# Altium schematic symbol library Vibration_Datalogger.SchLib: 75 symbols (part 4 of 7)
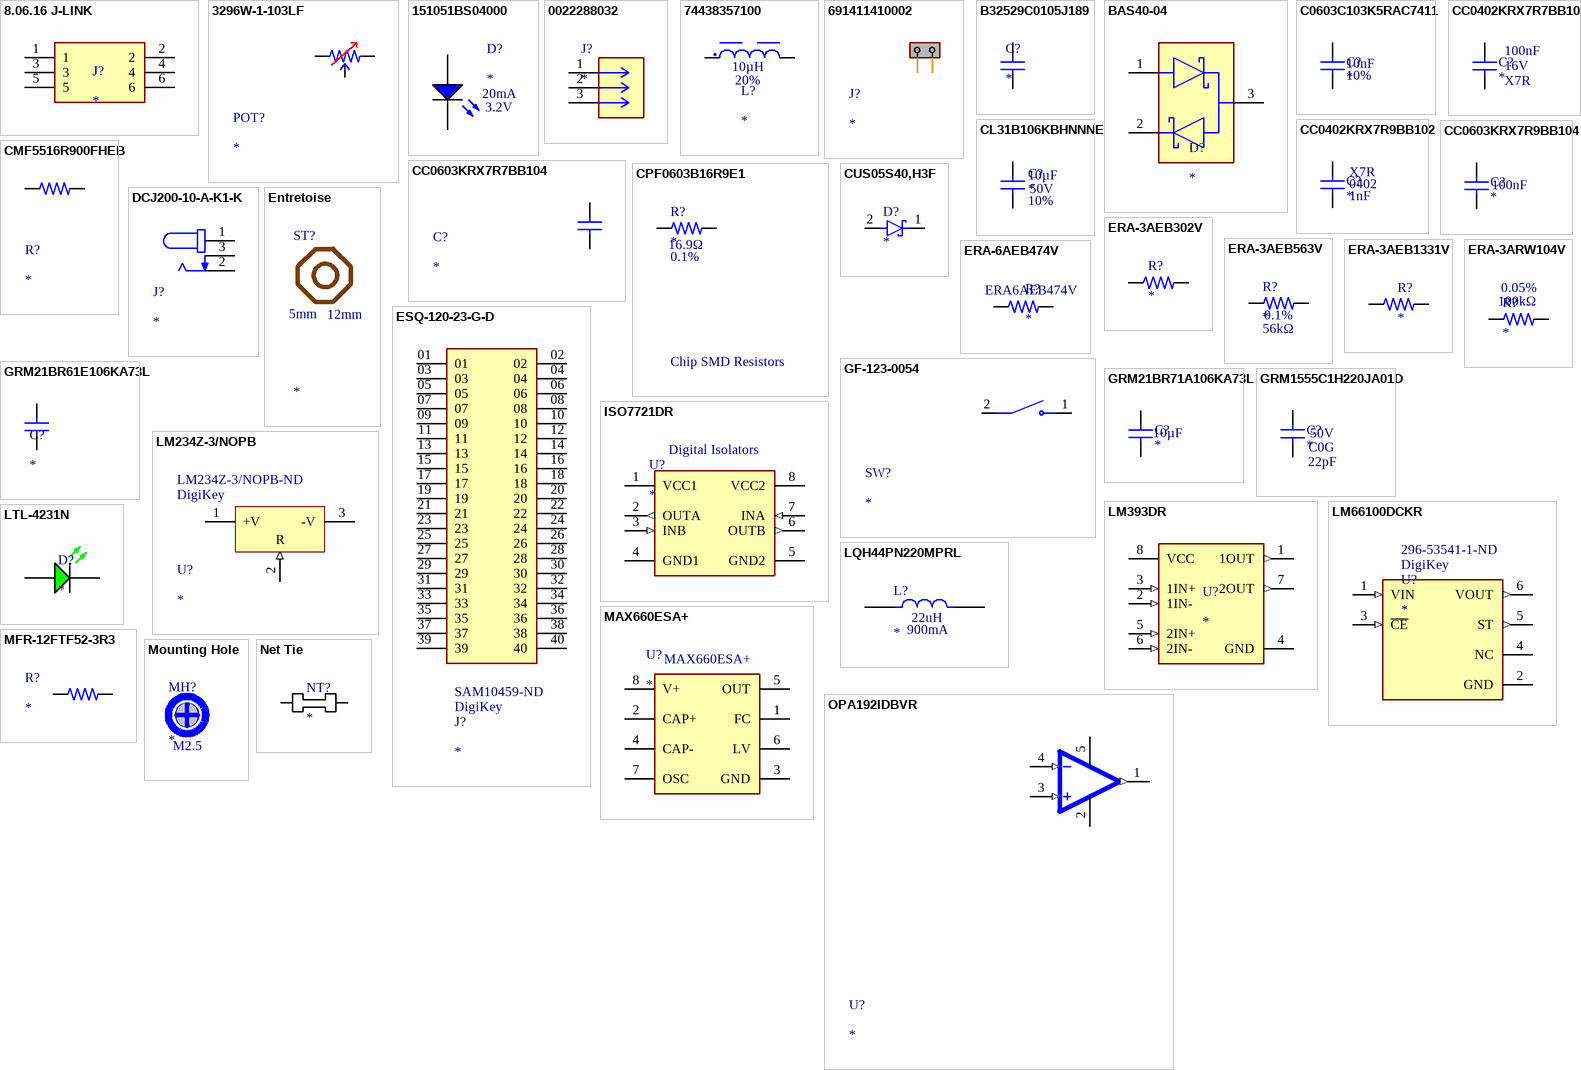
[diagram p4: symbols 8.06.16 J-LINK to OPA192IDBVR]

## LM66100DCKR
designator U?  Supplier 2: DigiKey  Supplier Part Number 2: 296-53541-1-ND
IC OR CTRLR IDEAL DIODE SC70-6; Manufacturer Lifecycle Status: PRODUCTION; Manufacturer: Analog Devices; Manufacturer Part Number: MAX40200EVKIT#; Lifecycle Status: Production; Number of Pins: 0; ComponentLink1URL: https://octopart.com:443/opatz8j6/c1?t=tFvwJybQxdRSwHGuV29_04fkZjjNF1MJo4kinNSI_C2zYoGudT1WcQQrGEb18paZwrfXNr0GAhVW6zbilzcBUB01kDOundBfp3nAPKdGzhNRfNcr8Kd-o-IKbnLChbPI5acuj80HihnZ3YpglhuC93YoD2liOY8pIrKlWfxI2ksNeIXQmkzMRd3OxJBCHjiq5JwTIkqXKKJBcnIlnmQq-BxXXM0xZlJtTE9yy0iN-9Jw-BxLeaepZGVZeQukyGP-V4ddPgPOIL7y7GG0xbs0JlcCHvXn2V6R1aO10raT6v7tAmg4PF3dHGB7KA&src-supplier=Analog+Devices; ComponentLink1Description: https://octopart.com:443/opatz8j6/c1?t=tFvwJybQxdRSwHGuV29_04fkZjjNF1MJo4kinNSI_C2zYoGudT1WcQQrGEb18paZwrfXNr0GAhVW6zbilzcBUB01kDOundBfp3nAPKdGzhNRfNcr8Kd-o-IKbnLChbPI5acuj80HihnZ3YpglhuC93YoD2liOY8pIrKlWfxI2ksNeIXQmkzMRd3OxJBCHjiq5JwTIkqXKKJBcnIlnmQq-BxXXM0xZlJtTE9yy0iN-9Jw-BxLeaepZGVZeQukyGP-V4ddPgPOIL7y7GG0xbs0JlcCHvXn2V6R1aO10raT6v7tAmg4PF3dHGB7KA&src-supplier=Analog+Devices; ComponentLink2URL: https://datasheet.octopart.com:443/MAX40200EVKIT%23-Analog-Devices-datasheet-68620197.pdf?src-supplier=Newark; ComponentLink2Description: https://datasheet.octopart.com:443/MAX40200EVKIT%23-Analog-Devices-datasheet-68620197.pdf?src-supplier=Newark; ComponentLink3URL: https://datasheet.octopart.com:443/MAX40200EVKIT%23-Maxim-Integrated-datasheet-97040573.pdf?src-supplier=Ciiva; ComponentLink3Description: https://datasheet.octopart.com:443/MAX40200EVKIT%23-Maxim-Integrated-datasheet-97040573.pdf?src-supplier=Ciiva; ComponentLink4URL: http://sigma.octopart.com:80/conflict_mineral_statement/Analog-Devices-company-33.pdf?src-supplier=Compliance+Statements; ComponentLink4Description: http://sigma.octopart.com:80/conflict_mineral_statement/Analog-Devices-company-33.pdf?src-supplier=Compliance+Statements; ComponentLink5URL: http://sigma.octopart.com:80/reach_statement/Maxim-Integrated-company-67.pdf?src-supplier=Compliance+Statements; ComponentLink5Description: http://sigma.octopart.com:80/reach_statement/Maxim-Integrated-company-67.pdf?src-supplier=Compliance+Statements; ComponentLink6URL: http://sigma.octopart.com:80/rohs_statement/Maxim-Integrated-company-66.pdf?src-supplier=Compliance+Statements; ComponentLink6Description: http://sigma.octopart.com:80/rohs_statement/Maxim-Integrated-company-66.pdf?src-supplier=Compliance+Statements; ComponentLink7URL: http://sigma.octopart.com:80/conflict_mineral_statement/Maxim-Integrated-company-65.pdf?src-supplier=Compliance+Statements; ComponentLink7Description: http://sigma.octopart.com:80/conflict_mineral_statement/Maxim-Integrated-company-65.pdf?src-supplier=Compliance+Statements; ComponentLink8URL: https://octopart.com:443/opatz8j6/c1?t=lhYu1Dpa7LTUDRbSap38YS8RgdPNFucjyNBj1iBkH97VRV8Rz1sSJR_WbuGUEwASAToy64Q0WSWPLIrJ0T-nAuuegVbGWQDHKGX6zqZYr7BGDpqmoHu2Bx2I_9gTjHXC6Q3FVvsiWqfKxC4DKphXuDHYAktRAVkNYmR-AyWh8y_m0Ao45k5rUSJWIEdRU4kKjG7oew-8Zey8BXwpe1A7gxB-7jWBlaKfgfRJWbIXmBBGq6MNPZxkt7axoHwTDuLmHCNj-BNWr3LFNcmmigWLHCOy2qpNNTU7f_1GGqCMT2krBxkwy2j1AE6zAA&src-supplier=Compliance+Statements; ComponentLink8Description: https://octopart.com:443/opatz8j6/c1?t=lhYu1Dpa7LTUDRbSap38YS8RgdPNFucjyNBj1iBkH97VRV8Rz1sSJR_WbuGUEwASAToy64Q0WSWPLIrJ0T-nAuuegVbGWQDHKGX6zqZYr7BGDpqmoHu2Bx2I_9gTjHXC6Q3FVvsiWqfKxC4DKphXuDHYAktRAVkNYmR-AyWh8y_m0Ao45k5rUSJWIEdRU4kKjG7oew-8Zey8BXwpe1A7gxB-7jWBlaKfgfRJWbIXmBBGq6MNPZxkt7axoHwTDuLmHCNj-BNWr3LFNcmmigWLHCOy2qpNNTU7f_1GGqCMT2krBxkwy2j1AE6zAA&src-supplier=Compliance+Statements; Supplier 1: DigiKey; Supplier Part Number 1: MAX40200EVKIT#-ND; Category: Amplifiers - Op Amps, Buffer, Instrumentation; Height: 1.1mm; Length: 2mm; Schedule B: 8542390000, 8542390000|8542390000|8542390000|8542390000|8542390000; Thickness: 900µm; Width: 1.25mm; ComponentLink9URL: https://sigma.octopart.com:443/182282881/technical_drawing/Texas-Instruments-LM66100DCKR.pdf?src-supplier=Texas+Instruments; ComponentLink9Description: https://sigma.octopart.com:443/182282881/technical_drawing/Texas-Instruments-LM66100DCKR.pdf?src-supplier=Texas+Instruments; ComponentLink10URL: https://octopart.com:443/opatz8j6/c1?t=gPN0KfNaSyl1Jmpah-FtwEVBma6UUM1rl0h9fkGMVmOMkDkGAR5eANZSmXeULewPONOsdPcJF3l7HmsVxdSPKkJhfxN-W-y3_Dz8nEmVy4_KCMSg8IKJ1aK1b6dd_-lBB8AspW_E3SjYcpWMYk21piWnDxo2wj_olAEqlfdPT3wM4A0W15MhlRfy1F4koMZBOZ1iTSy3Fn5Q08Ie82jiMGpjle9KvlKTYKALn1cbScAkVWpjv40trNU2vz6I3zWF1hu3m4xMYxVIRa3xiN9pV6fBa2Lpcw1bs8mCpy-ETl7Wi3TV7TgH1BZJhC7NO3ryfYbwwTmsEcijnrG4LoteN3ANdJgPfKX2jeXCkaz5iFtb7oDgnzFTK08_BwgTfkX6eAf0F7jE&src-supplier=Texas+Instruments; ComponentLink10Description: https://octopart.com:443/opatz8j6/c1?t=gPN0KfNaSyl1Jmpah-FtwEVBma6UUM1rl0h9fkGMVmOMkDkGAR5eANZSmXeULewPONOsdPcJF3l7HmsVxdSPKkJhfxN-W-y3_Dz8nEmVy4_KCMSg8IKJ1aK1b6dd_-lBB8AspW_E3SjYcpWMYk21piWnDxo2wj_olAEqlfdPT3wM4A0W15MhlRfy1F4koMZBOZ1iTSy3Fn5Q08Ie82jiMGpjle9KvlKTYKALn1cbScAkVWpjv40trNU2vz6I3zWF1hu3m4xMYxVIRa3xiN9pV6fBa2Lpcw1bs8mCpy-ETl7Wi3TV7TgH1BZJhC7NO3ryfYbwwTmsEcijnrG4LoteN3ANdJgPfKX2jeXCkaz5iFtb7oDgnzFTK08_BwgTfkX6eAf0F7jE&src-supplier=Texas+Instruments; ComponentLink11URL: https://sigma.octopart.com:443/178868976/technical_drawing/Texas-Instruments-LM66100DCKR.pdf?src-supplier=Texas+Instruments; ComponentLink11Description: https://sigma.octopart.com:443/178868976/technical_drawing/Texas-Instruments-LM66100DCKR.pdf?src-supplier=Texas+Instruments; ComponentLink12URL: https://sigma.octopart.com:443/49249328/technical_drawing/Texas-Instruments-LM66100DCKR.pdf?src-supplier=Texas+Instruments; ComponentLink12Description: https://sigma.octopart.com:443/49249328/technical_drawing/Texas-Instruments-LM66100DCKR.pdf?src-supplier=Texas+Instruments; ComponentLink13URL: https://datasheet.octopart.com:443/LM66100DCKR-Texas-Instruments-datasheet-159115275.pdf?src-supplier=SHENGYU+ELECTRONICS; ComponentLink13Description: https://datasheet.octopart.com:443/LM66100DCKR-Texas-Instruments-datasheet-159115275.pdf?src-supplier=SHENGYU+ELECTRONICS; ComponentLink14URL: https://datasheet.octopart.com:443/LM66100DCKR-Texas-Instruments-datasheet-159115156.pdf?src-supplier=LCSC; ComponentLink14Description: https://datasheet.octopart.com:443/LM66100DCKR-Texas-Instruments-datasheet-159115156.pdf?src-supplier=LCSC; ComponentLink15URL: http://sigma.octopart.com:80/reach_statement/Texas-Instruments-company-64.pdf?src-supplier=Compliance+Statements; ComponentLink15Description: http://sigma.octopart.com:80/reach_statement/Texas-Instruments-company-64.pdf?src-supplier=Compliance+Statements; ComponentLink16URL: http://sigma.octopart.com:80/conflict_mineral_statement/Texas-Instruments-company-63.pdf?src-supplier=Compliance+Statements; ComponentLink16Description: http://sigma.octopart.com:80/conflict_mineral_statement/Texas-Instruments-company-63.pdf?src-supplier=Compliance+Statements
footprint LM66100DCKR (IC OR CTRLR IDEAL DIODE SC70-6)
pins: 1 VIN (in), 2 GND (power), 3 ~{CE} (in), 4 NC, 5 ST (out), 6 VOUT (out)

## LQH44PN220MPRL
designator L?  RMS Current (Irms): 900mA
FIXED IND 22UH 900MA 290 MOHM; Core Material: Ferrite; DC Resistance (DCR): 348mΩ; Number of Circuits: 1; Resistance: 290mΩ; Saturation Current: 1.05A; Self Resonant Frequency: 17MHz; Shielding: Shielded; Test Frequency: 100kHz; Tolerance: 20%; Inductance: 22µH; Case/Package: 1515; Composition: Wirewound; Height: 1.65mm; Length: 4mm; Lifecycle Status: Production; Max Current Rating: 900mA; Max Operating Temperature: 125°C; Min Operating Temperature: -40°C; Number of Terminals: 2; REACH SVHC: Yes; Series Resistance: 348mΩ; Width: 4mm; ComponentLink1URL: http://sigma.octopart.com:80/reach_statement/Murata-company-16.pdf?src-supplier=Compliance+Statements; ComponentLink1Description: http://sigma.octopart.com:80/reach_statement/Murata-company-16.pdf?src-supplier=Compliance+Statements
footprint LQH44PN220MPRL (FIXED IND 22UH 900MA 290 MOHM)
pins: 1, 2
text: 22uH

## LTL-4231N
designator D?
LED GREEN DIFFUSED T/H
footprint LTL-4233 (LED GREEN DIFFUSED T-1 3/4 T/H)
pins: 1 A, 2 K

## MAX660ESA+
designator U?  Manufacturer Part Number: MAX660ESA+
IC REG CHRG PUMP INV 100MA 8SOIC; Manufacturer Lifecycle Status: PRODUCTION; Manufacturer: Analog Devices; Frequency: 80kHz; Max Power Dissipation: 471mW; Max Supply Voltage: 5.5V; Min Supply Voltage: 1.5V; Number of Outputs: 1; Output Type: Adjustable, Fixed; Output Voltage: -5.5V; Topology: Charge Pump; Height: 1.75mm; Lead Free: Lead Free; Lifecycle Status: Production; Max Operating Temperature: 85°C; Min Operating Temperature: -40°C; Number of Pins: 8; Output Current: 100mA; Packaging: Cut Tape; Schedule B: 8542390000|8542390000|8542390000|8542390000|8542390000|8542390000|8542390000|8542390000|8542390000|8542390000|8542390000|8542390000|8542390000|8542390000|8542390000|8542390000|8542390000|8542390000|8542390000|8542390000|8542390000|8542390000|8542390000|85; Switching Frequency: 80kHz; ComponentLink1URL: https://octopart.com:443/opatz8j6/c1?t=BWm-YoLOFKb6oTKA2-Oa4woj27f-4YlCw5RYG4XUvLKyF9jhqQp7CDL1R-jUfGSIj8ojPOaXqpXMzOVEXwzj2LU6GuUqVKy7rwppXb6Yhe4DcuX79IRSBrO0V0NOqZ5Kv--2xZ3GHk-ilmZIs_As33ZUjG3zZiE6Tsxk00EUgeO-VTdb5C75kIUUrUAAbuqL1eYBnEZWyx91WmaafFy1hHjUlVhFkCDvZPzEqQi0WpARzDPBuDggqnmZtUecc_6gAtnHDSZQU4AbmUeUFKfNs9EDVHME16KlOUrtC6ejHgeZa6J1DqKojKU&src-supplier=Analog+Devices; ComponentLink1Description: https://octopart.com:443/opatz8j6/c1?t=BWm-YoLOFKb6oTKA2-Oa4woj27f-4YlCw5RYG4XUvLKyF9jhqQp7CDL1R-jUfGSIj8ojPOaXqpXMzOVEXwzj2LU6GuUqVKy7rwppXb6Yhe4DcuX79IRSBrO0V0NOqZ5Kv--2xZ3GHk-ilmZIs_As33ZUjG3zZiE6Tsxk00EUgeO-VTdb5C75kIUUrUAAbuqL1eYBnEZWyx91WmaafFy1hHjUlVhFkCDvZPzEqQi0WpARzDPBuDggqnmZtUecc_6gAtnHDSZQU4AbmUeUFKfNs9EDVHME16KlOUrtC6ejHgeZa6J1DqKojKU&src-supplier=Analog+Devices; ComponentLink2URL: https://sigma.octopart.com:443/138896678/technical_drawing/Maxim-Integrated-MAX660ESA%2B.pdf?src-supplier=Upverter; ComponentLink2Description: https://sigma.octopart.com:443/138896678/technical_drawing/Maxim-Integrated-MAX660ESA%2B.pdf?src-supplier=Upverter; ComponentLink3URL: https://datasheet.octopart.com:443/MAX660ESA%2B-Analog-Devices-datasheet-88072.pdf?src-supplier=Augswan; ComponentLink3Description: https://datasheet.octopart.com:443/MAX660ESA%2B-Analog-Devices-datasheet-88072.pdf?src-supplier=Augswan; ComponentLink4URL: https://datasheet.octopart.com:443/MAX660ESA%2B-Maxim-Integrated-datasheet-14167743.pdf?src-supplier=iiiC; ComponentLink4Description: https://datasheet.octopart.com:443/MAX660ESA%2B-Maxim-Integrated-datasheet-14167743.pdf?src-supplier=iiiC; ComponentLink5URL: https://datasheet.octopart.com:443/MAX660ESA%2B-Maxim-datasheet-8202664.pdf?src-supplier=Jameco; ComponentLink5Description: https://datasheet.octopart.com:443/MAX660ESA%2B-Maxim-datasheet-8202664.pdf?src-supplier=Jameco; ComponentLink6URL: http://sigma.octopart.com:80/conflict_mineral_statement/Analog-Devices-company-33.pdf?src-supplier=Compliance+Statements; ComponentLink6Description: http://sigma.octopart.com:80/conflict_mineral_statement/Analog-Devices-company-33.pdf?src-supplier=Compliance+Statements; ComponentLink7URL: http://sigma.octopart.com:80/reach_statement/Maxim-Integrated-company-67.pdf?src-supplier=Compliance+Statements; ComponentLink7Description: http://sigma.octopart.com:80/reach_statement/Maxim-Integrated-company-67.pdf?src-supplier=Compliance+Statements; ComponentLink8URL: http://sigma.octopart.com:80/rohs_statement/Maxim-Integrated-company-66.pdf?src-supplier=Compliance+Statements; ComponentLink8Description: http://sigma.octopart.com:80/rohs_statement/Maxim-Integrated-company-66.pdf?src-supplier=Compliance+Statements; ComponentLink9URL: http://sigma.octopart.com:80/conflict_mineral_statement/Maxim-Integrated-company-65.pdf?src-supplier=Compliance+Statements; ComponentLink9Description: http://sigma.octopart.com:80/conflict_mineral_statement/Maxim-Integrated-company-65.pdf?src-supplier=Compliance+Statements; ComponentLink10URL: https://octopart.com:443/opatz8j6/c1?t=6seefSOhUnOhzho5f4xQzZxdMuzbyeX7e8GBP5GegPS5CIC4FLhGv9yyG7ITNmWqyiOeZamLNDV5KM8kLBPmWRpLipLEtqI0-UiQBhDpynsWuVJpY5DkYT-_WsnyYhRjHQRBGyfJu1WorA2bij2JhiLp4UPMZHCvQ6LWlYx2m7RLIqC0SmPcNbIfF0islbt2kir-QpHsqy3ruEwWWKir7ntLI5t72NWQmumO78YAP0BIbclvvZsZAIbyQ9oE_OmHW3VhlMLq6mYts_hLwHsHL5kN8P2U5bWrEFkUMOIg7-xCQI2zOd6uap0&src-supplier=Compliance+Statements; ComponentLink10Description: https://octopart.com:443/opatz8j6/c1?t=6seefSOhUnOhzho5f4xQzZxdMuzbyeX7e8GBP5GegPS5CIC4FLhGv9yyG7ITNmWqyiOeZamLNDV5KM8kLBPmWRpLipLEtqI0-UiQBhDpynsWuVJpY5DkYT-_WsnyYhRjHQRBGyfJu1WorA2bij2JhiLp4UPMZHCvQ6LWlYx2m7RLIqC0SmPcNbIfF0islbt2kir-QpHsqy3ruEwWWKir7ntLI5t72NWQmumO78YAP0BIbclvvZsZAIbyQ9oE_OmHW3VhlMLq6mYts_hLwHsHL5kN8P2U5bWrEFkUMOIg7-xCQI2zOd6uap0&src-supplier=Compliance+Statements; Supplier 1: DigiKey; Supplier Part Number 1: MAX660ESA+-ND; Category: Voltage Regulators - Switching
footprint MAX660ESA+ (IC REG CHRG PUMP INV 100MA 8SOIC)
pins: 1 FC, 2 CAP+, 3 GND (power), 4 CAP-, 5 OUT (power), 6 LV, 7 OSC, 8 V+ (power)

## MFR-12FTF52-3R3
designator R?
Trou traversant 3.3 OHM 1/6W 1%; Lead Diameter: 450µm; Power Dissipation: 166.7mW; Resistance: 3.3Ω; Temperature Coefficient: 100ppm/°C; Voltage Rating: 200V; Case/Package: Axial; China RoHS: Compliant; Country of Origin: Mainland China; Diameter: 1.9mm; Export Control Classification Number (ECCN) Code: EAR99; Harmonized Tariff Schedule (HTS) Code: 8533.21.00.90; Introduction Date: 2010-12-31; Lifecycle Status: Production; Max Operating Temperature: 155°C; Min Operating Temperature: -55°C; Number of Terminals: 2; REACH SVHC: Yes; Termination: Axial; Tolerance: 1%; Voltage Rating (DC): 200V; Working Voltage: 200V; ComponentLink1URL: https://datasheet.octopart.com:443/MFR-12FTF52-3R3-Yageo-datasheet-155367622.pdf?src-supplier=IHS; ComponentLink1Description: https://datasheet.octopart.com:443/MFR-12FTF52-3R3-Yageo-datasheet-155367622.pdf?src-supplier=IHS; ComponentLink2URL: https://datasheet.octopart.com/MFR-12FTF52-3R3-Yageo-datasheet-28066692.pdf; ComponentLink2Description: https://datasheet.octopart.com/MFR-12FTF52-3R3-Yageo-datasheet-28066692.pdf; ComponentLink3URL: http://sigma.octopart.com:80/conflict_mineral_statement/Yageo-company-3.pdf?src-supplier=Compliance+Statements; ComponentLink3Description: http://sigma.octopart.com:80/conflict_mineral_statement/Yageo-company-3.pdf?src-supplier=Compliance+Statements; ComponentLink4URL: http://sigma.octopart.com:80/rohs_statement/Yageo-company-2.pdf?src-supplier=Compliance+Statements; ComponentLink4Description: http://sigma.octopart.com:80/rohs_statement/Yageo-company-2.pdf?src-supplier=Compliance+Statements
footprint MFR-12FTF52-3R3 (Through Hole 3.3 OHM 1/6W 1%)
pins: 1, 2

## Mounting Hole
designator MH?  Diamétre interne: M2.5
Mounting Holes M2.5 PTH; Diamétre externe: 5mm
footprint Mounting Hole (Mounting Hole PTH M2.5)

## Net Tie
designator NT?
footprint Net_Tie
pins: 1, 2

## OPA192IDBVR
designator U?
IC OPAMP GP 1 CIRCUIT SOT23-5; Manufacturer Lifecycle Status: ACTIVE; Manufacturer: Texas Instruments; Manufacturer Part Number: OPA192IDBVR; Bandwidth: 10MHz; Input Bias Current: 5pA; Input Offset Voltage (Vos): 5µV; Max Supply Voltage: 36V; Min Supply Voltage: 4.5V; Number of Amplifiers: 1; Operating Supply Current: 1mA; Output Current per Channel: 65mA; Slew Rate: 20V/µs; Case/Package: SOT-23; Gain Bandwidth Product: 10MHz; Height: 1.45mm; Lead Free: Lead Free; Length: 2.9mm; Lifecycle Status: Production; Max Operating Temperature: 125°C; Min Operating Temperature: -40°C; Number of Channels: 1; Number of Circuits: 1; Number of Pins: 5; Packaging: Tape and Reel; REACH SVHC: No; Schedule B: 8542330000, 8542330000|8542330000|8542330000|8542330000|8542330000; Thickness: 1.2mm; Width: 1.6mm; ComponentLink1URL: https://sigma.octopart.com:443/177332311/technical_drawing/Texas-Instruments-OPA192IDBVR.pdf?src-supplier=Texas+Instruments; ComponentLink1Description: https://sigma.octopart.com:443/177332311/technical_drawing/Texas-Instruments-OPA192IDBVR.pdf?src-supplier=Texas+Instruments; ComponentLink2URL: https://octopart.com:443/opatz8j6/c1?t=dAKocRLazFotpGX_OdNlOCsvszTXPO7QjYOI6j_MbqosY_E8ZLbxbut_2FlyCA3AsKxqqYyzQF6RfCi2BhFQiSPcAdliOL4F5p-69LKfhsJCBEUFZhC51lSEiHLYlKOM2GyBM7JOPt5pKPnG7tn8JWDPKJ9dRVDl57KrmHkK3n07D91OAab4cXNzmHb2sIePeYqc5TAIOwCBLNPJE96OieXM0yYKGcwAok07xUJX2m_m6wuRdE57VQCXytZ8vyxMZgsg9oxr8qeLDfoKUymY6graNEUtSJMHnbGOc4kbomBYz9L2eyl7Et1Ibbuax0cN4JBPy_i24jjrhNal4momaYXJUZvSDW7-5ddE-QhWI2YuBBrxsruk7zmTeKdjW_AZ0BPQcg&src-supplier=Texas+Instruments; ComponentLink2Description: https://octopart.com:443/opatz8j6/c1?t=dAKocRLazFotpGX_OdNlOCsvszTXPO7QjYOI6j_MbqosY_E8ZLbxbut_2FlyCA3AsKxqqYyzQF6RfCi2BhFQiSPcAdliOL4F5p-69LKfhsJCBEUFZhC51lSEiHLYlKOM2GyBM7JOPt5pKPnG7tn8JWDPKJ9dRVDl57KrmHkK3n07D91OAab4cXNzmHb2sIePeYqc5TAIOwCBLNPJE96OieXM0yYKGcwAok07xUJX2m_m6wuRdE57VQCXytZ8vyxMZgsg9oxr8qeLDfoKUymY6graNEUtSJMHnbGOc4kbomBYz9L2eyl7Et1Ibbuax0cN4JBPy_i24jjrhNal4momaYXJUZvSDW7-5ddE-QhWI2YuBBrxsruk7zmTeKdjW_AZ0BPQcg&src-supplier=Texas+Instruments; ComponentLink3URL: https://sigma.octopart.com:443/175570406/technical_drawing/Texas-Instruments-OPA192IDBVR.pdf?src-supplier=Texas+Instruments; ComponentLink3Description: https://sigma.octopart.com:443/175570406/technical_drawing/Texas-Instruments-OPA192IDBVR.pdf?src-supplier=Texas+Instruments; ComponentLink4URL: https://sigma.octopart.com:443/169406034/technical_drawing/Texas-Instruments-OPA192IDBVR.pdf?src-supplier=Texas+Instruments; ComponentLink4Description: https://sigma.octopart.com:443/169406034/technical_drawing/Texas-Instruments-OPA192IDBVR.pdf?src-supplier=Texas+Instruments; ComponentLink5URL: https://sigma.octopart.com:443/155939316/technical_drawing/Texas-Instruments-OPA192IDBVR.pdf?src-supplier=Texas+Instruments; ComponentLink5Description: https://sigma.octopart.com:443/155939316/technical_drawing/Texas-Instruments-OPA192IDBVR.pdf?src-supplier=Texas+Instruments; ComponentLink6URL: https://sigma.octopart.com:443/102331370/technical_drawing/Texas-Instruments-OPA192IDBVR.pdf?src-supplier=Texas+Instruments; ComponentLink6Description: https://sigma.octopart.com:443/102331370/technical_drawing/Texas-Instruments-OPA192IDBVR.pdf?src-supplier=Texas+Instruments; ComponentLink7URL: https://datasheet.octopart.com:443/OPA192IDBVR-Texas-Instruments-datasheet-41216690.pdf?src-supplier=Texas+Instruments; ComponentLink7Description: https://datasheet.octopart.com:443/OPA192IDBVR-Texas-Instruments-datasheet-41216690.pdf?src-supplier=Texas+Instruments; ComponentLink8URL: https://datasheet.octopart.com:443/OPA192IDBVR-Texas-Instruments-datasheet-38965043.pdf?src-supplier=Texas+Instruments; ComponentLink8Description: https://datasheet.octopart.com:443/OPA192IDBVR-Texas-Instruments-datasheet-38965043.pdf?src-supplier=Texas+Instruments; ComponentLink9URL: https://datasheet.octopart.com:443/OPA192IDBVR-Texas-Instruments-datasheet-38229673.pdf?src-supplier=Texas+Instruments; ComponentLink9Description: https://datasheet.octopart.com:443/OPA192IDBVR-Texas-Instruments-datasheet-38229673.pdf?src-supplier=Texas+Instruments; ComponentLink10URL: https://sigma.octopart.com:443/49249325/technical_drawing/Texas-Instruments-OPA192IDBVR.pdf?src-supplier=Texas+Instruments; ComponentLink10Description: https://sigma.octopart.com:443/49249325/technical_drawing/Texas-Instruments-OPA192IDBVR.pdf?src-supplier=Texas+Instruments; ComponentLink11URL: https://datasheet.octopart.com:443/OPA192IDBVR-Texas-Instruments-datasheet-21773461.pdf?src-supplier=Texas+Instruments; ComponentLink11Description: https://datasheet.octopart.com:443/OPA192IDBVR-Texas-Instruments-datasheet-21773461.pdf?src-supplier=Texas+Instruments; ComponentLink12URL: https://datasheet.octopart.com:443/OPA192IDBVR-Texas-Instruments-datasheet-21256375.pdf?src-supplier=Texas+Instruments; ComponentLink12Description: https://datasheet.octopart.com:443/OPA192IDBVR-Texas-Instruments-datasheet-21256375.pdf?src-supplier=Texas+Instruments; ComponentLink13URL: https://datasheet.octopart.com:443/OPA192IDBVR-Texas-Instruments-datasheet-61016689.pdf?src-supplier=Newark; ComponentLink13Description: https://datasheet.octopart.com:443/OPA192IDBVR-Texas-Instruments-datasheet-61016689.pdf?src-supplier=Newark; ComponentLink14URL: https://datasheet.octopart.com:443/OPA192IDBVR-Texas-Instruments-datasheet-43921497.pdf?src-supplier=element14+APAC; ComponentLink14Description: https://datasheet.octopart.com:443/OPA192IDBVR-Texas-Instruments-datasheet-43921497.pdf?src-supplier=element14+APAC; ComponentLink15URL: https://datasheet.octopart.com:443/OPA192IDBVR-Texas-Instruments-datasheet-48370340.pdf?src-supplier=element14+APAC; ComponentLink15Description: https://datasheet.octopart.com:443/OPA192IDBVR-Texas-Instruments-datasheet-48370340.pdf?src-supplier=element14+APAC; ComponentLink16URL: https://datasheet.octopart.com:443/OPA192IDBVR-Texas-Instruments-datasheet-164415909.pdf?src-supplier=SHENGYU+ELECTRONICS; ComponentLink16Description: https://datasheet.octopart.com:443/OPA192IDBVR-Texas-Instruments-datasheet-164415909.pdf?src-supplier=SHENGYU+ELECTRONICS; ComponentLink17URL: https://datasheet.octopart.com:443/OPA192IDBVR-Texas-Instruments-datasheet-92908940.pdf?src-supplier=TME; ComponentLink17Description: https://datasheet.octopart.com:443/OPA192IDBVR-Texas-Instruments-datasheet-92908940.pdf?src-supplier=TME; ComponentLink18URL: https://datasheet.octopart.com:443/OPA192IDBVR-Texas-Instruments-datasheet-140571581.pdf?src-supplier=Arrow.cn; ComponentLink18Description: https://datasheet.octopart.com:443/OPA192IDBVR-Texas-Instruments-datasheet-140571581.pdf?src-supplier=Arrow.cn; ComponentLink19URL: http://sigma.octopart.com:80/reach_statement/Texas-Instruments-company-64.pdf?src-supplier=Compliance+Statements; ComponentLink19Description: http://sigma.octopart.com:80/reach_statement/Texas-Instruments-company-64.pdf?src-supplier=Compliance+Statements; ComponentLink20URL: http://sigma.octopart.com:80/conflict_mineral_statement/Texas-Instruments-company-63.pdf?src-supplier=Compliance+Statements; ComponentLink20Description: http://sigma.octopart.com:80/conflict_mineral_statement/Texas-Instruments-company-63.pdf?src-supplier=Compliance+Statements; Supplier 1: DigiKey; Supplier Part Number 1: 296-42105-1-ND; Category: Amplifiers - Op Amps, Buffer, Instrumentation
footprint OPA192IDBVR (IC OPAMP GP 1 CIRCUIT SOT23-5)
pins: 1 OUT (out), 2 V- (power), 3 +IN (in), 4 -IN (in), 5 V+ (power)

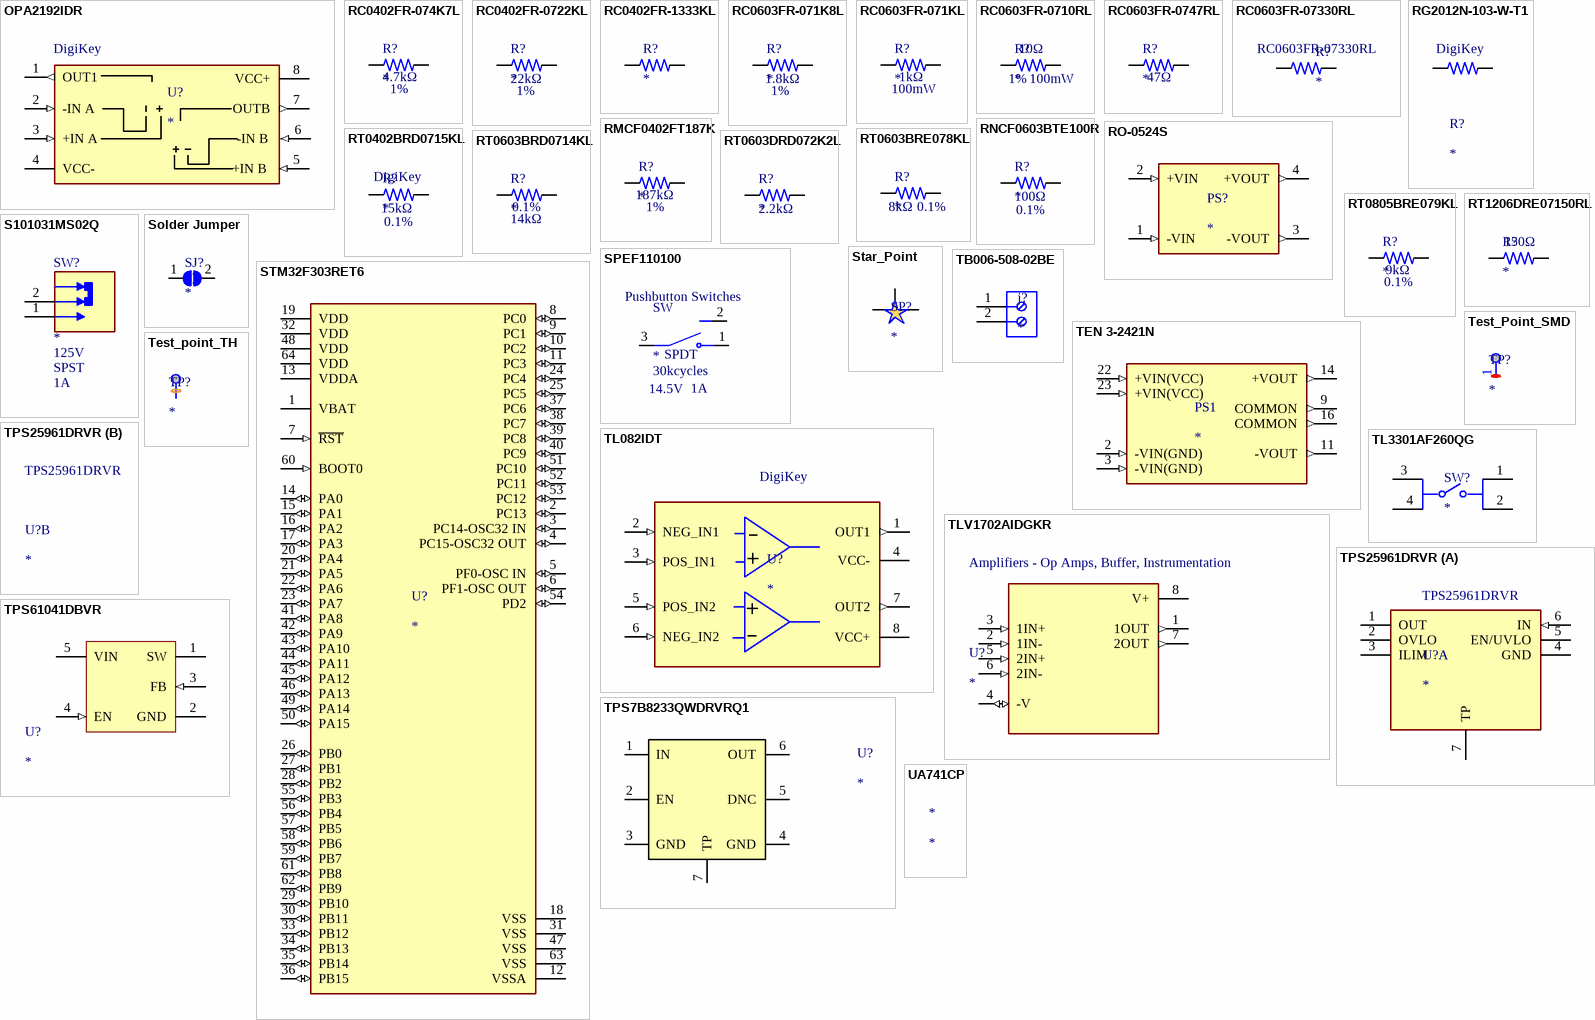
[diagram p1: symbols OPA2192IDR to UA741CP]

## OPA2192IDR
designator U?  Supplier 1: DigiKey
IC OPAMP GP 2 CIRCUIT 8SOIC; Manufacturer: STMicroelectronics; Manufacturer Part Number: TL082IDT; Manufacturer Lifecycle Status: ACTIVE; Bandwidth: 4MHz; Common Mode Rejection Ratio: 80dB; Input Bias Current: 200pA; Input Offset Voltage (Vos): 13mV; Max Dual Supply Voltage: 18V; Max Power Dissipation: 680mW; Max Supply Current: 2.5mA; Min Dual Supply Voltage: 3V; Min Supply Voltage: 6V; Nominal Supply Current: 1.4mA; Number of Amplifiers: 2; Operating Supply Voltage: 15V; Output Current: 40mA; Slew Rate: 8V/µs; Voltage Gain: 106.02dB; Case/Package: SO; China RoHS: Compliant; Contact Plating: Tin; Country of Origin: Mainland China, Morocco; Export Control Classification Number (ECCN) Code: EAR99; Gain Bandwidth Product: 4MHz; Height: 1.25mm; Height - Seated (Max): 1.75mm; Harmonized Tariff Schedule (HTS) Code: 8542.33.00.01; Introduction Date: 1980-01-04; Length: 4.9mm; Lifecycle Status: Production; Max Operating Temperature: 105°C; Max Supply Voltage: 18V; Min Operating Temperature: -40°C; Mount: Surface Mount; Number of Channels: 2; Number of Circuits: 2; Number of Elements: 2; Number of Pins: 8; Number of Terminals: 2; Operating Supply Current: 1.4mA; Output Current per Channel: 40mA; Packaging: Tape and Reel; Power Dissipation: 680mW; Radiation Hardening: No; REACH SVHC: Yes; Schedule B: 8542330000, 8542330000|8542330000|8542330000|8542330000|8542330000|8542330000|8542330000|8542330000|8542330000|8542330000|8542330000|8542330000|8542330000|8542330000|8542330000|8542330000|8542330000|8542330000|8542330000|8542330000|8542330000|8542330000|8542330000|85; Temperature Grade: Industrial; Terminal Pitch: 1.27mm; Unity Gain Bandwidth Product: 4MHz; Width: 3.9mm; ComponentLink1URL: https://datasheet.octopart.com:443/TL082IDT-STMicroelectronics-datasheet-68295580.pdf?src-supplier=Newark; ComponentLink1Description: https://datasheet.octopart.com:443/TL082IDT-STMicroelectronics-datasheet-68295580.pdf?src-supplier=Newark; ComponentLink2URL: https://datasheet.octopart.com:443/TL082IDT-STMicroelectronics-datasheet-10692279.pdf?src-supplier=Newark; ComponentLink2Description: https://datasheet.octopart.com:443/TL082IDT-STMicroelectronics-datasheet-10692279.pdf?src-supplier=Newark; ComponentLink3URL: https://datasheet.octopart.com:443/TL082IDT-STMicroelectronics-datasheet-37002800.pdf?src-supplier=element14+APAC; ComponentLink3Description: https://datasheet.octopart.com:443/TL082IDT-STMicroelectronics-datasheet-37002800.pdf?src-supplier=element14+APAC; ComponentLink4URL: https://datasheet.octopart.com:443/TL082IDT-STMicroelectronics-datasheet-5315494.pdf?src-supplier=STMicroelectronics; ComponentLink4Description: https://datasheet.octopart.com:443/TL082IDT-STMicroelectronics-datasheet-5315494.pdf?src-supplier=STMicroelectronics; ComponentLink5URL: https://datasheet.octopart.com:443/TL082IDT-STMicroelectronics-datasheet-20031.pdf?src-supplier=Sierra+IC; ComponentLink5Description: https://datasheet.octopart.com:443/TL082IDT-STMicroelectronics-datasheet-20031.pdf?src-supplier=Sierra+IC; ComponentLink6URL: https://datasheet.octopart.com:443/TL082IDT-STMicroelectronics-datasheet-14138407.pdf?src-supplier=iiiC; ComponentLink6Description: https://datasheet.octopart.com:443/TL082IDT-STMicroelectronics-datasheet-14138407.pdf?src-supplier=iiiC; Category: Amplifiers - Op Amps, Buffer, Instrumentation; Lead Free: Lead Free; Thickness: 1.58mm; ComponentLink7URL: https://datasheet.octopart.com:443/OPA2192IDR-Texas-Instruments-datasheet-41216690.pdf?src-supplier=Texas+Instruments; ComponentLink7Description: https://datasheet.octopart.com:443/OPA2192IDR-Texas-Instruments-datasheet-41216690.pdf?src-supplier=Texas+Instruments; ComponentLink8URL: https://octopart.com:443/opatz8j6/c1?t=2jMPwhJaFj21i54Nabx5wcBwzc_v34gRnVrgDQ7eoTPi6NA-KLSm2uSIBq4XMvkakJrwpjUok_iH5xNbqqgCjQHATgNagnWJ1GBKhYwvDjzxIebgjcBKya2R1xlzTxGnyXFKqQU3SisWdQfHaW__C_MbdE4_ZQ7vmsF44oQ_12mJHVIUpozdPche9huG8eP8gFv-vuS7pdJ7u4vGdUzf5gxgYo936ChnChzKCxlAOP2qNn2hOVAUdpol2nRIQsLgsA4TAAZho4OqyIkKr-xneLZ_sFFifMNCA69dyKZbDpzOhpbS9-Z9Rqoxad8quOtMa2QkPYzIb9-UhzkV0iAVoOIs8qtH9HHyo4x-P8sbbqVwKESVmCagTjFNAgp_124KubOeTSI&src-supplier=Texas+Instruments; ComponentLink8Description: https://octopart.com:443/opatz8j6/c1?t=2jMPwhJaFj21i54Nabx5wcBwzc_v34gRnVrgDQ7eoTPi6NA-KLSm2uSIBq4XMvkakJrwpjUok_iH5xNbqqgCjQHATgNagnWJ1GBKhYwvDjzxIebgjcBKya2R1xlzTxGnyXFKqQU3SisWdQfHaW__C_MbdE4_ZQ7vmsF44oQ_12mJHVIUpozdPche9huG8eP8gFv-vuS7pdJ7u4vGdUzf5gxgYo936ChnChzKCxlAOP2qNn2hOVAUdpol2nRIQsLgsA4TAAZho4OqyIkKr-xneLZ_sFFifMNCA69dyKZbDpzOhpbS9-Z9Rqoxad8quOtMa2QkPYzIb9-UhzkV0iAVoOIs8qtH9HHyo4x-P8sbbqVwKESVmCagTjFNAgp_124KubOeTSI&src-supplier=Texas+Instruments; ComponentLink9URL: https://datasheet.octopart.com:443/OPA2192IDR-Texas-Instruments-datasheet-38965043.pdf?src-supplier=Texas+Instruments; ComponentLink9Description: https://datasheet.octopart.com:443/OPA2192IDR-Texas-Instruments-datasheet-38965043.pdf?src-supplier=Texas+Instruments; ComponentLink10URL: https://datasheet.octopart.com:443/OPA2192IDR-Texas-Instruments-datasheet-38229673.pdf?src-supplier=Texas+Instruments; ComponentLink10Description: https://datasheet.octopart.com:443/OPA2192IDR-Texas-Instruments-datasheet-38229673.pdf?src-supplier=Texas+Instruments; ComponentLink11URL: https://datasheet.octopart.com:443/OPA2192IDR-Texas-Instruments-datasheet-21773461.pdf?src-supplier=Texas+Instruments; ComponentLink11Description: https://datasheet.octopart.com:443/OPA2192IDR-Texas-Instruments-datasheet-21773461.pdf?src-supplier=Texas+Instruments; ComponentLink12URL: https://sigma.octopart.com:443/49249642/technical_drawing/Texas-Instruments-OPA2192IDR.pdf?src-supplier=Texas+Instruments; ComponentLink12Description: https://sigma.octopart.com:443/49249642/technical_drawing/Texas-Instruments-OPA2192IDR.pdf?src-supplier=Texas+Instruments; ComponentLink13URL: https://datasheet.octopart.com:443/OPA2192IDR-Texas-Instruments-datasheet-61016689.pdf?src-supplier=element14+APAC; ComponentLink13Description: https://datasheet.octopart.com:443/OPA2192IDR-Texas-Instruments-datasheet-61016689.pdf?src-supplier=element14+APAC; ComponentLink14URL: https://datasheet.octopart.com:443/OPA2192IDR-Texas-Instruments-datasheet-43921497.pdf?src-supplier=element14+APAC; ComponentLink14Description: https://datasheet.octopart.com:443/OPA2192IDR-Texas-Instruments-datasheet-43921497.pdf?src-supplier=element14+APAC; ComponentLink15URL: https://datasheet.octopart.com:443/OPA2192IDR-Texas-Instruments-datasheet-48370340.pdf?src-supplier=element14+APAC; ComponentLink15Description: https://datasheet.octopart.com:443/OPA2192IDR-Texas-Instruments-datasheet-48370340.pdf?src-supplier=element14+APAC; ComponentLink16URL: https://datasheet.octopart.com:443/OPA2192IDR-Texas-Instruments-datasheet-165810930.pdf?src-supplier=LCSC; ComponentLink16Description: https://datasheet.octopart.com:443/OPA2192IDR-Texas-Instruments-datasheet-165810930.pdf?src-supplier=LCSC; ComponentLink17URL: https://datasheet.octopart.com:443/OPA2192IDR-Texas-Instruments-datasheet-159115559.pdf?src-supplier=LCSC; ComponentLink17Description: https://datasheet.octopart.com:443/OPA2192IDR-Texas-Instruments-datasheet-159115559.pdf?src-supplier=LCSC; ComponentLink18URL: http://sigma.octopart.com:80/reach_statement/Texas-Instruments-company-64.pdf?src-supplier=Compliance+Statements; ComponentLink18Description: http://sigma.octopart.com:80/reach_statement/Texas-Instruments-company-64.pdf?src-supplier=Compliance+Statements; ComponentLink19URL: http://sigma.octopart.com:80/conflict_mineral_statement/Texas-Instruments-company-63.pdf?src-supplier=Compliance+Statements; ComponentLink19Description: http://sigma.octopart.com:80/conflict_mineral_statement/Texas-Instruments-company-63.pdf?src-supplier=Compliance+Statements; Supplier Part Number 1: 296-42106-6-ND
footprint OPA2192IDR (IC OPAMP GP 2 CIRCUIT 8SOIC)
pins: 1 OUT1 (out), 2 -IN A (in), 3 +IN A (in), 4 VCC- (power), 5 +IN B  (in), 6 -IN B  (in), 7 OUTB (out), 8 VCC+ (power)

## RC0402FR-074K7L
designator R?  Tolerance: 1%  Resistance: 4.7kΩ
RES 4.7K OHM 1% 1/16W 0402; Manufacturer: Yageo Group; Manufacturer Part Number: RC0402FR-074K7L; Power Rating: 62.5mW; Temperature Coefficient: 100ppm/°C; Voltage Rating: 50V; Case/Package: 0402; Case Code (Imperial): 0402; Case Code (Metric): 1005; China RoHS: Non-Compliant; Composition: Thick Film; Country of Origin: Mainland China, Taiwan; Depth: 500µm; Export Control Classification Number (ECCN) Code: EAR99; Height: 350µm; Harmonized Tariff Schedule (HTS) Code: 8533.21.00.30; Introduction Date: 2008-07-18; Lead Free: Lead Free; Length: 1mm; Lifecycle Status: Production; Max Operating Temperature: 155°C; Military Standard: Not; Min Operating Temperature: -55°C; Mount: Surface Mount; Number of Pins: 2; Number of Terminals: 2; Packaging: Tape & Reel; REACH SVHC: Yes; Schedule B: 8533210045, 8533210045|8533210045, 8533210045|8533210045|8533210045, 8533210045|8533210045|8533210045|8533210045; Termination: SMD/SMT; Voltage Rating (AC): 50V; Voltage Rating (DC): 50V; Width: 500µm; Working Voltage: 50V; ComponentLink1URL: https://datasheet.octopart.com:443/RC0402FR-074K7L-Yageo-datasheet-175887523.pdf?src-supplier=IHS; ComponentLink1Description: https://datasheet.octopart.com:443/RC0402FR-074K7L-Yageo-datasheet-175887523.pdf?src-supplier=IHS; ComponentLink2URL: https://datasheet.octopart.com:443/RC0402FR-074K7L-Yageo-datasheet-103092701.pdf?src-supplier=Upverter; ComponentLink2Description: https://datasheet.octopart.com:443/RC0402FR-074K7L-Yageo-datasheet-103092701.pdf?src-supplier=Upverter; ComponentLink3URL: https://datasheet.octopart.com:443/RC0402FR-074K7L-Yageo-datasheet-98239111.pdf?src-supplier=Upverter; ComponentLink3Description: https://datasheet.octopart.com:443/RC0402FR-074K7L-Yageo-datasheet-98239111.pdf?src-supplier=Upverter; ComponentLink4URL: https://datasheet.octopart.com:443/RC0402FR-074K7L-Yageo-Group-datasheet-190305687.pdf?src-supplier=Future+Electronics; ComponentLink4Description: https://datasheet.octopart.com:443/RC0402FR-074K7L-Yageo-Group-datasheet-190305687.pdf?src-supplier=Future+Electronics; ComponentLink5URL: https://datasheet.octopart.com:443/RC0402FR-074K7L-Yageo-datasheet-164759695.pdf?src-supplier=Future+Electronics; ComponentLink5Description: https://datasheet.octopart.com:443/RC0402FR-074K7L-Yageo-datasheet-164759695.pdf?src-supplier=Future+Electronics; ComponentLink6URL: https://datasheet.octopart.com:443/RC0402FR-074K7L-Yageo-datasheet-137700087.pdf?src-supplier=Future+Electronics; ComponentLink6Description: https://datasheet.octopart.com:443/RC0402FR-074K7L-Yageo-datasheet-137700087.pdf?src-supplier=Future+Electronics; ComponentLink7URL: https://datasheet.octopart.com:443/RC0402FR-074K7L-Yageo-Group-datasheet-190051977.pdf?src-supplier=Newark; ComponentLink7Description: https://datasheet.octopart.com:443/RC0402FR-074K7L-Yageo-Group-datasheet-190051977.pdf?src-supplier=Newark; ComponentLink8URL: https://datasheet.octopart.com:443/RC0402FR-074K7L-Yageo-datasheet-12531192.pdf?src-supplier=Newark; ComponentLink8Description: https://datasheet.octopart.com:443/RC0402FR-074K7L-Yageo-datasheet-12531192.pdf?src-supplier=Newark; ComponentLink9URL: https://datasheet.octopart.com:443/RC0402FR-074K7L-Yageo-datasheet-8324527.pdf?src-supplier=Newark; ComponentLink9Description: https://datasheet.octopart.com:443/RC0402FR-074K7L-Yageo-datasheet-8324527.pdf?src-supplier=Newark; ComponentLink10URL: https://datasheet.octopart.com:443/RC0402FR-074K7L-Yageo-datasheet-10408619.pdf?src-supplier=element14+APAC; ComponentLink10Description: https://datasheet.octopart.com:443/RC0402FR-074K7L-Yageo-datasheet-10408619.pdf?src-supplier=element14+APAC; ComponentLink11URL: https://datasheet.octopart.com:443/RC0402FR-074K7L-Yageo-datasheet-13691069.pdf?src-supplier=element14+APAC; ComponentLink11Description: https://datasheet.octopart.com:443/RC0402FR-074K7L-Yageo-datasheet-13691069.pdf?src-supplier=element14+APAC; ComponentLink12URL: https://datasheet.octopart.com:443/RC0402FR-074K7L-Yageo-datasheet-62067350.pdf?src-supplier=Farnell; ComponentLink12Description: https://datasheet.octopart.com:443/RC0402FR-074K7L-Yageo-datasheet-62067350.pdf?src-supplier=Farnell; ComponentLink13URL: https://datasheet.octopart.com:443/RC0402FR-074K7L-Yageo-datasheet-8329306.pdf?src-supplier=element14; ComponentLink13Description: https://datasheet.octopart.com:443/RC0402FR-074K7L-Yageo-datasheet-8329306.pdf?src-supplier=element14; ComponentLink14URL: https://datasheet.octopart.com:443/RC0402FR-074K7L-Yageo-datasheet-175423674.pdf?src-supplier=SOS+electronic; ComponentLink14Description: https://datasheet.octopart.com:443/RC0402FR-074K7L-Yageo-datasheet-175423674.pdf?src-supplier=SOS+electronic; ComponentLink15URL: https://datasheet.octopart.com:443/RC0402FR-074K7L-Yageo-datasheet-79472498.pdf?src-supplier=Megastar; ComponentLink15Description: https://datasheet.octopart.com:443/RC0402FR-074K7L-Yageo-datasheet-79472498.pdf?src-supplier=Megastar; ComponentLink16URL: https://datasheet.octopart.com/RC0402FR-074K7L-Yageo-datasheet-73766026.pdf; ComponentLink16Description: https://datasheet.octopart.com/RC0402FR-074K7L-Yageo-datasheet-73766026.pdf; ComponentLink17URL: http://sigma.octopart.com:80/conflict_mineral_statement/Yageo-company-3.pdf?src-supplier=Compliance+Statements; ComponentLink17Description: http://sigma.octopart.com:80/conflict_mineral_statement/Yageo-company-3.pdf?src-supplier=Compliance+Statements; ComponentLink18URL: http://sigma.octopart.com:80/rohs_statement/Yageo-company-2.pdf?src-supplier=Compliance+Statements; ComponentLink18Description: http://sigma.octopart.com:80/rohs_statement/Yageo-company-2.pdf?src-supplier=Compliance+Statements; Supplier 1: DigiKey; Supplier Part Number 1: 311-4.7KLRDKR-ND; Category: Chip SMD Resistors
footprint RC0402FR-074K7L (RES 4.7K OHM 1% 1/16W 0402)
pins: 1, 2

## RC0402FR-0722KL
designator R?  Tolerance: 1%  Resistance: 22kΩ
RES 22K OHM 1% 1/16W 0402; Max Power Dissipation: 63mW; Power Rating: 62.5mW; Temperature Coefficient: 100ppm/°C; Voltage Rating: 50V; Case/Package: 0402; Case Code (Imperial): 0402; China RoHS: Non-Compliant; Composition: Thick Film; Depth: 500µm; Features: Moisture Resistant; Height: 350µm; Lead Free: Lead Free; Length: 1mm; Lifecycle Status: Production; Max Operating Temperature: 155°C; Military Standard: Not; Min Operating Temperature: -55°C; Mount: Surface Mount; Number of Pins: 2; Number of Terminals: 2; Number of Terminations: 2; Packaging: Tape & Reel; REACH SVHC: Yes; Schedule B: 8533210045, 8533210045|8533210045, 8533210045|8533210045|8533210045, 8533210045|8533210045|8533210045|8533210045; Termination: SMD/SMT; Voltage Rating (AC): 50V; Voltage Rating (DC): 50V; Width: 500µm; Working Voltage: 50V; ComponentLink1URL: https://datasheet.octopart.com:443/RC0402FR-0722KL-Yageo-datasheet-175887523.pdf?src-supplier=IHS; ComponentLink1Description: https://datasheet.octopart.com:443/RC0402FR-0722KL-Yageo-datasheet-175887523.pdf?src-supplier=IHS; ComponentLink2URL: https://datasheet.octopart.com:443/RC0402FR-0722KL-Yageo-datasheet-10408619.pdf?src-supplier=element14+APAC; ComponentLink2Description: https://datasheet.octopart.com:443/RC0402FR-0722KL-Yageo-datasheet-10408619.pdf?src-supplier=element14+APAC; ComponentLink3URL: https://datasheet.octopart.com:443/RC0402FR-0722KL-Yageo-datasheet-62067350.pdf?src-supplier=element14+APAC; ComponentLink3Description: https://datasheet.octopart.com:443/RC0402FR-0722KL-Yageo-datasheet-62067350.pdf?src-supplier=element14+APAC; ComponentLink4URL: https://datasheet.octopart.com:443/RC0402FR-0722KL-Yageo-datasheet-103092701.pdf?src-supplier=Upverter; ComponentLink4Description: https://datasheet.octopart.com:443/RC0402FR-0722KL-Yageo-datasheet-103092701.pdf?src-supplier=Upverter; ComponentLink5URL: https://datasheet.octopart.com:443/RC0402FR-0722KL-Yageo-Group-datasheet-190305687.pdf?src-supplier=Future+Electronics; ComponentLink5Description: https://datasheet.octopart.com:443/RC0402FR-0722KL-Yageo-Group-datasheet-190305687.pdf?src-supplier=Future+Electronics; ComponentLink6URL: https://datasheet.octopart.com:443/RC0402FR-0722KL-Yageo-datasheet-164759695.pdf?src-supplier=Future+Electronics; ComponentLink6Description: https://datasheet.octopart.com:443/RC0402FR-0722KL-Yageo-datasheet-164759695.pdf?src-supplier=Future+Electronics; ComponentLink7URL: https://datasheet.octopart.com:443/RC0402FR-0722KL-Yageo-datasheet-137700087.pdf?src-supplier=Future+Electronics; ComponentLink7Description: https://datasheet.octopart.com:443/RC0402FR-0722KL-Yageo-datasheet-137700087.pdf?src-supplier=Future+Electronics; ComponentLink8URL: https://datasheet.octopart.com:443/RC0402FR-0722KL-Yageo-datasheet-12531192.pdf?src-supplier=Future+Electronics; ComponentLink8Description: https://datasheet.octopart.com:443/RC0402FR-0722KL-Yageo-datasheet-12531192.pdf?src-supplier=Future+Electronics; ComponentLink9URL: https://datasheet.octopart.com:443/RC0402FR-0722KL-Yageo-datasheet-8324255.pdf?src-supplier=Future+Electronics; ComponentLink9Description: https://datasheet.octopart.com:443/RC0402FR-0722KL-Yageo-datasheet-8324255.pdf?src-supplier=Future+Electronics; ComponentLink10URL: https://datasheet.octopart.com:443/RC0402FR-0722KL-Yageo-datasheet-8329306.pdf?src-supplier=element14; ComponentLink10Description: https://datasheet.octopart.com:443/RC0402FR-0722KL-Yageo-datasheet-8329306.pdf?src-supplier=element14; ComponentLink11URL: https://datasheet.octopart.com:443/RC0402FR-0722KL-Yageo-datasheet-8324527.pdf?src-supplier=Newark; ComponentLink11Description: https://datasheet.octopart.com:443/RC0402FR-0722KL-Yageo-datasheet-8324527.pdf?src-supplier=Newark; ComponentLink12URL: https://datasheet.octopart.com:443/RC0402FR-0722KL-Yageo-datasheet-175423674.pdf?src-supplier=SOS+electronic; ComponentLink12Description: https://datasheet.octopart.com:443/RC0402FR-0722KL-Yageo-datasheet-175423674.pdf?src-supplier=SOS+electronic; ComponentLink13URL: https://datasheet.octopart.com:443/RC0402FR-0722KL-Yageo-datasheet-148775077.pdf?src-supplier=TME; ComponentLink13Description: https://datasheet.octopart.com:443/RC0402FR-0722KL-Yageo-datasheet-148775077.pdf?src-supplier=TME; ComponentLink14URL: https://datasheet.octopart.com:443/RC0402FR-0722KL-Yageo-datasheet-79472498.pdf?src-supplier=Megastar; ComponentLink14Description: https://datasheet.octopart.com:443/RC0402FR-0722KL-Yageo-datasheet-79472498.pdf?src-supplier=Megastar; ComponentLink15URL: https://datasheet.octopart.com/RC0402FR-0722KL-Yageo-datasheet-73766026.pdf; ComponentLink15Description: https://datasheet.octopart.com/RC0402FR-0722KL-Yageo-datasheet-73766026.pdf; ComponentLink16URL: http://sigma.octopart.com:80/conflict_mineral_statement/Yageo-company-3.pdf?src-supplier=Compliance+Statements; ComponentLink16Description: http://sigma.octopart.com:80/conflict_mineral_statement/Yageo-company-3.pdf?src-supplier=Compliance+Statements; ComponentLink17URL: http://sigma.octopart.com:80/rohs_statement/Yageo-company-2.pdf?src-supplier=Compliance+Statements; ComponentLink17Description: http://sigma.octopart.com:80/rohs_statement/Yageo-company-2.pdf?src-supplier=Compliance+Statements
footprint RC0402FR-0722KL (RES 22K OHM 1% 1/16W 0402)
pins: 1, 2

## RC0402FR-1333KL
designator R?
RES SMD 33K OHM 0.1% 1/16W 0402; Manufacturer Lifecycle Status: ACTIVE; Part Series: Thin Film Chip Resistors, High Reliability Type; Manufacturer: Panasonic; Manufacturer Part Number: ERA2AEB333X; Max Power Dissipation: 63mW; Resistance: 33kΩ; Temperature Coefficient: 25ppm/°C; Voltage Rating: 25V; Working Voltage: 50V; Case/Package: 0402; Case Code (Imperial): 0402; Case Code (Metric): 1005; China RoHS: Non-Compliant; Composition: Thin Film; Contact Plating: Tin; Depth: 500µm; Height: 350µm; Lead Free: Lead Free; Length: 1mm; Lifecycle Status: Production; Max Operating Temperature: 155°C; Military Standard: Not; Min Operating Temperature: -55°C; Mount: Surface Mount; Number of Pins: 2; Number of Terminals: 2; Number of Terminations: 2; Packaging: Cut Tape; Power Rating: 63mW; Radiation Hardening: No; Ratings: AEC-Q200; REACH SVHC: Yes; Schedule B: 8533210045, 8533210045|8533210045|8533210045|8533210045|8533210045; Termination: SMD/SMT; Tolerance: 0.1%; Voltage Rating (DC): 25V; Width: 500µm; ComponentLink1URL: https://datasheet.octopart.com:443/ERA2AEB333X-Panasonic-datasheet-62287448.pdf?src-supplier=element14+APAC; ComponentLink1Description: https://datasheet.octopart.com:443/ERA2AEB333X-Panasonic-datasheet-62287448.pdf?src-supplier=element14+APAC; ComponentLink2URL: https://datasheet.octopart.com:443/ERA-2AEB333X-Panasonic-datasheet-61114971.pdf?src-supplier=element14+APAC; ComponentLink2Description: https://datasheet.octopart.com:443/ERA-2AEB333X-Panasonic-datasheet-61114971.pdf?src-supplier=element14+APAC; ComponentLink3URL: https://datasheet.octopart.com:443/ERA2AEB333X-Panasonic-datasheet-13266200.pdf?src-supplier=Electro+Sonic; ComponentLink3Description: https://datasheet.octopart.com:443/ERA2AEB333X-Panasonic-datasheet-13266200.pdf?src-supplier=Electro+Sonic; ComponentLink4URL: https://datasheet.octopart.com:443/ERA-2AEB333X-Panasonic-datasheet-33006989.pdf?src-supplier=Electro+Sonic; ComponentLink4Description: https://datasheet.octopart.com:443/ERA-2AEB333X-Panasonic-datasheet-33006989.pdf?src-supplier=Electro+Sonic; ComponentLink5URL: https://datasheet.octopart.com:443/ERA-2AEB333X-Panasonic-datasheet-46744048.pdf?src-supplier=Electro+Sonic; ComponentLink5Description: https://datasheet.octopart.com:443/ERA-2AEB333X-Panasonic-datasheet-46744048.pdf?src-supplier=Electro+Sonic; ComponentLink6URL: https://datasheet.octopart.com:443/ERA2AEB333X-Panasonic-datasheet-12510007.pdf?src-supplier=Future+Electronics; ComponentLink6Description: https://datasheet.octopart.com:443/ERA2AEB333X-Panasonic-datasheet-12510007.pdf?src-supplier=Future+Electronics; ComponentLink7URL: https://datasheet.octopart.com:443/ERA2AEB333X-Panasonic-datasheet-11763931.pdf?src-supplier=Future+Electronics; ComponentLink7Description: https://datasheet.octopart.com:443/ERA2AEB333X-Panasonic-datasheet-11763931.pdf?src-supplier=Future+Electronics; ComponentLink8URL: https://datasheet.octopart.com:443/ERA2AEB333X-Panasonic-datasheet-10840895.pdf?src-supplier=Future+Electronics; ComponentLink8Description: https://datasheet.octopart.com:443/ERA2AEB333X-Panasonic-datasheet-10840895.pdf?src-supplier=Future+Electronics; ComponentLink9URL: https://datasheet.octopart.com:443/ERA2AEB333X-Panasonic-datasheet-8367715.pdf?src-supplier=Future+Electronics; ComponentLink9Description: https://datasheet.octopart.com:443/ERA2AEB333X-Panasonic-datasheet-8367715.pdf?src-supplier=Future+Electronics; ComponentLink10URL: https://datasheet.octopart.com:443/ERA2AEB333X-Panasonic-datasheet-5392808.pdf?src-supplier=Future+Electronics; ComponentLink10Description: https://datasheet.octopart.com:443/ERA2AEB333X-Panasonic-datasheet-5392808.pdf?src-supplier=Future+Electronics; ComponentLink11URL: https://datasheet.octopart.com:443/ERA2AEB333X-Panasonic-datasheet-136531316.pdf?src-supplier=Newark; ComponentLink11Description: https://datasheet.octopart.com:443/ERA2AEB333X-Panasonic-datasheet-136531316.pdf?src-supplier=Newark; ComponentLink12URL: https://datasheet.octopart.com:443/ERA2AEB333X-Panasonic---ECG-datasheet-22087624.pdf?src-supplier=Newark; ComponentLink12Description: https://datasheet.octopart.com:443/ERA2AEB333X-Panasonic---ECG-datasheet-22087624.pdf?src-supplier=Newark; ComponentLink13URL: https://datasheet.octopart.com:443/ERA2AEB333X-Panasonic-datasheet-184398012.pdf?src-supplier=JRH+Electronics; ComponentLink13Description: https://datasheet.octopart.com:443/ERA2AEB333X-Panasonic-datasheet-184398012.pdf?src-supplier=JRH+Electronics; ComponentLink14URL: https://datasheet.octopart.com:443/ERA-2AEB333X-Panasonic-datasheet-154766165.pdf?src-supplier=Master+Electronics; ComponentLink14Description: https://datasheet.octopart.com:443/ERA-2AEB333X-Panasonic-datasheet-154766165.pdf?src-supplier=Master+Electronics; ComponentLink15URL: https://datasheet.octopart.com:443/ERA2AEB333X-Panasonic-datasheet-5311861.pdf?src-supplier=element14; ComponentLink15Description: https://datasheet.octopart.com:443/ERA2AEB333X-Panasonic-datasheet-5311861.pdf?src-supplier=element14; ComponentLink16URL: https://datasheet.octopart.com:443/ERA2AEB333X-Panasonic-datasheet-188913046.pdf?src-supplier=TME; ComponentLink16Description: https://datasheet.octopart.com:443/ERA2AEB333X-Panasonic-datasheet-188913046.pdf?src-supplier=TME; ComponentLink17URL: https://datasheet.octopart.com:443/ERA2AEB333X-Panasonic-datasheet-182736486.pdf?src-supplier=HQonline; ComponentLink17Description: https://datasheet.octopart.com:443/ERA2AEB333X-Panasonic-datasheet-182736486.pdf?src-supplier=HQonline; ComponentLink18URL: https://sigma.octopart.com:443/150570796/technical_drawing/Panasonic-ERA2AEB333X.pdf?src-supplier=Panasonic+SCT; ComponentLink18Description: https://sigma.octopart.com:443/150570796/technical_drawing/Panasonic-ERA2AEB333X.pdf?src-supplier=Panasonic+SCT; ComponentLink19URL: https://datasheet.octopart.com/ERA2AEB333X-Panasonic-datasheet-78375410.pdf; ComponentLink19Description: https://datasheet.octopart.com/ERA2AEB333X-Panasonic-datasheet-78375410.pdf; ComponentLink20URL: https://datasheet.octopart.com:443/ERA2AEB333X-Panasonic-datasheet-10050158.pdf?src-supplier=Arrow+Electronics; ComponentLink20Description: https://datasheet.octopart.com:443/ERA2AEB333X-Panasonic-datasheet-10050158.pdf?src-supplier=Arrow+Electronics; ComponentLink21URL: https://datasheet.octopart.com:443/ERA2AEB333X-Panasonic-datasheet-7542722.pdf?src-supplier=Farnell; ComponentLink21Description: https://datasheet.octopart.com:443/ERA2AEB333X-Panasonic-datasheet-7542722.pdf?src-supplier=Farnell; Supplier 1: Newark; Supplier Part Number 1: ERA2AEB333X; Category: Chip SMD Resistors
footprint RC0402FR-1333KL (RES 33K OHM 1% 1/16W 0402)
pins: 1, 2